# Altium footprint library CM5_Projeto_R6.PcbLib: 38 footprints (part 1 of 3)
Each footprint in its own frame and in the unit in brackets; x right, y up, seen from the top. Pads: shape width x height; smd on the part's side, far side on the other; paste and mask are expansions set on the pad; w line width, h text height; cw(c..) or ccw(c..) is an arc to the next point about the centre after c.
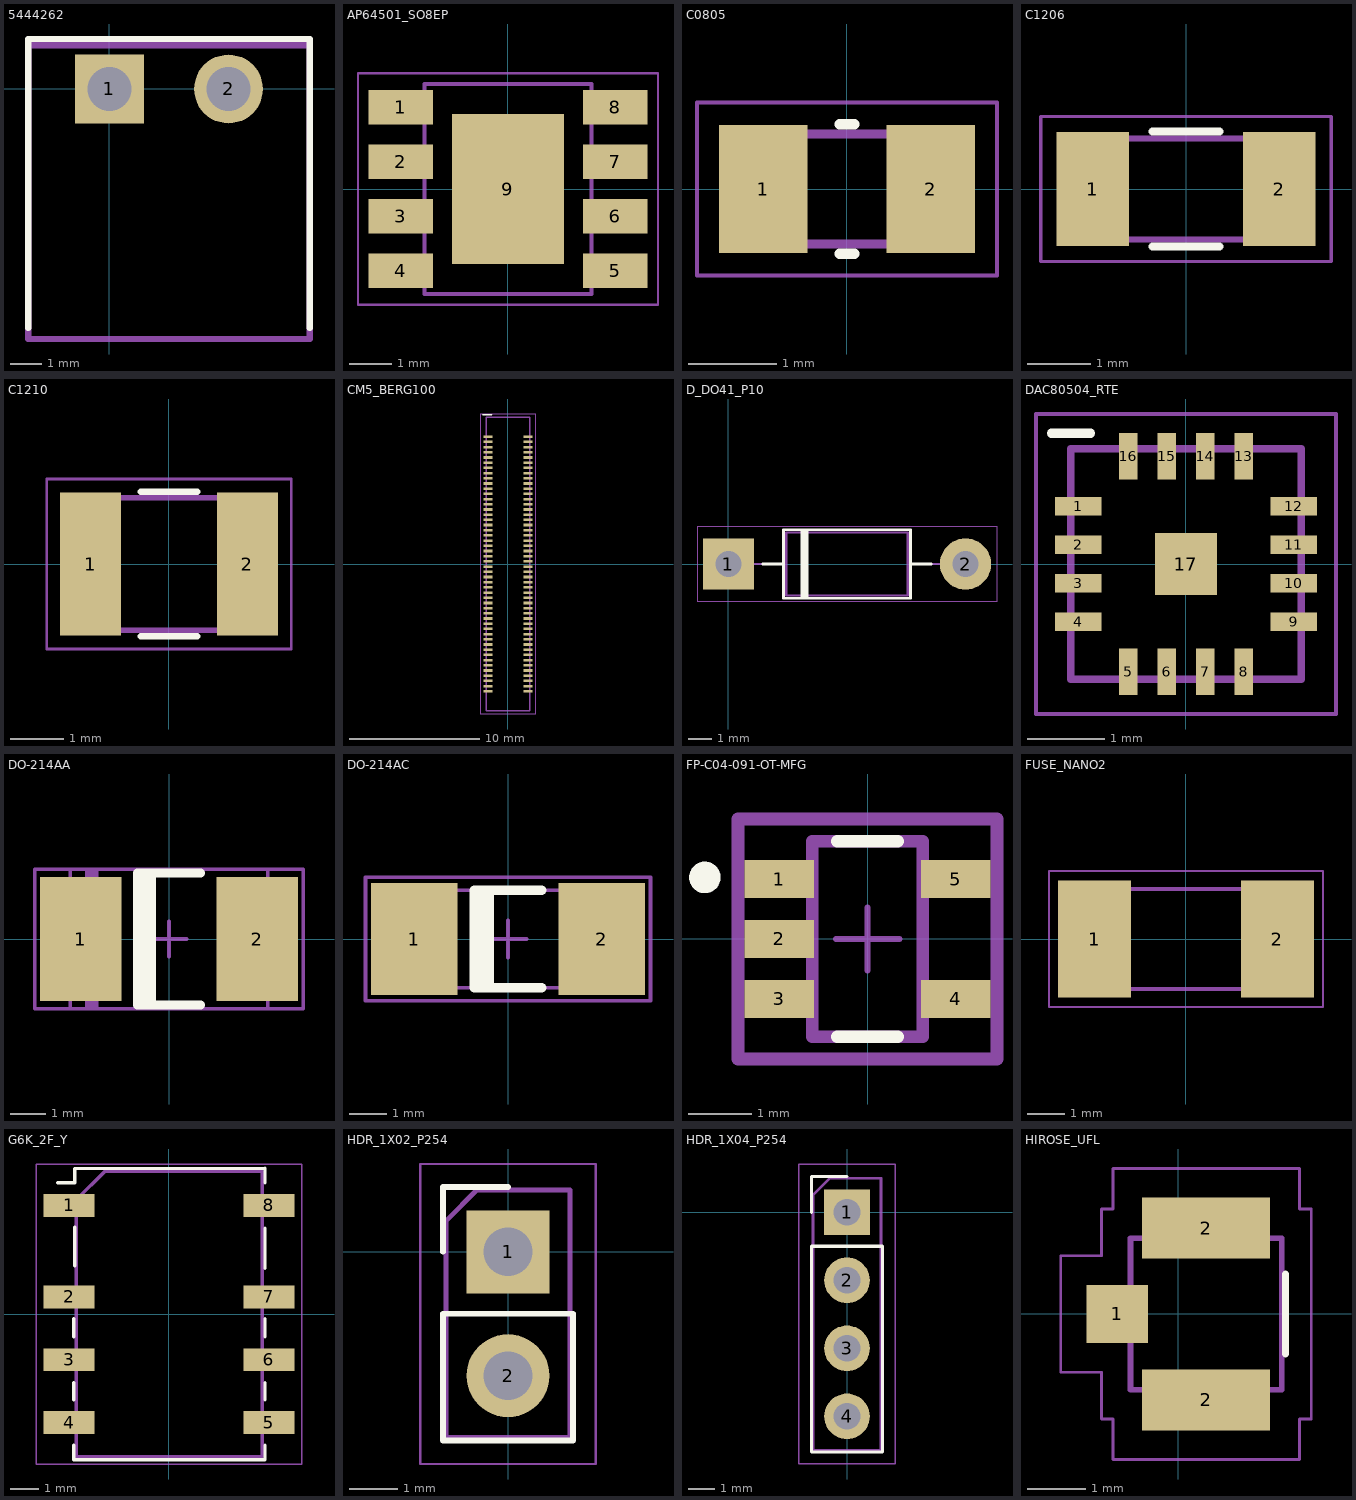
[diagram p0: the footprints below, top view; thin cyan lines are the x and y axes]

## 5444262 [mm] "Phoenix 5444262; 2 vias 3.81 mm. Modelo STEP extraido do PCB_Source_IoT; plug 5447861 incluido na montagem 3D."
height 11.2
pads (2):
  rect 2.2x2.2 hole 1.4 mask+0.1: 1(0,0)
  round 2.2 hole 1.4 mask+0.1: 2(3.81,0)
Top Overlay:
  lines w0.2: -2.6,-7.65 -2.6,1.6 6.41,1.6 6.41,-7.65
Bottom Assembly:
  lines w0.2: 6.4,-8 -2.6,-8 -2.6,1.4 6.41,1.4 6.41,-8
Bottom Component Center:
  lines w0.2: -2.6,-8 6.41,-8 6.41,1.4 -2.6,1.4 -2.6,-8
Top Component Center (Mech16):
  text "'.Designator'" at 1.789,-4.331 h1.5
3D body "pxc_1803277_05_MC-1-5-2-G-3-81_3D.stp": height 7.25, standoff -3.4, extent -2.6,-7.95 6.41,1.35
3D body "pxc_1803578_07_MC-1-5-2-ST-3-81_3D.stp": height 7.7, standoff -3.4, extent -2.3,-18.6 6.11,-2.5

## AP64501_SO8EP [mm] "CM5 R3; fonte: CM5_Photonic.PcbLib; serigrafia revisada a 10 mil"
pads (9):
  rect 1.505x0.802 smd paste+0 mask+0.05: 1(-2.497,1.905) 2(-2.497,0.635) 3(-2.497,-0.635) 4(-2.497,-1.905) 5(2.498,-1.905) 6(2.498,-0.635) 7(2.498,0.635) 8(2.498,1.905)
  rect 2.613x3.502 smd paste-3.502 mask+0.05: 9(0,0)
Top Paste:
  rectangle: -1.163,0.176 -0.143,1.575
  rectangle: -1.163,-1.575 -0.143,-0.175
  rectangle: 0.143,0.176 1.163,1.575
  rectangle: 0.143,-1.575 1.163,-0.175
Bottom Assembly:
  lines w0.1: -1.95,-2.45 -1.95,2.45 1.95,2.45 1.95,-2.45 -1.95,-2.45
Bottom Component Center:
  lines w0.05: -3.5,-2.7 -3.5,2.7 3.5,2.7 3.5,-2.7 -3.5,-2.7
3D body "AP64501_SO8EP.step": height 1.75, standoff 0, extent -3,-2.45 3,2.45

## C0805 [mm] "CM5 R3; fonte: CM5_Photonic.PcbLib; serigrafia revisada a 10 mil"
pads (2):
  rect 1x1.45 smd paste+0 mask+0.05: 1(-0.95,0) 2(0.95,0)
Top Overlay:
  lines w0.12: -0.08,-0.735 0.08,-0.735 ; -0.08,0.735 0.08,0.735
Bottom Assembly:
  lines w0.1: -1,-0.625 -1,0.625 1,0.625 1,-0.625 -1,-0.625
Bottom Component Center:
  lines w0.05: -1.7,-0.98 -1.7,0.98 1.7,0.98 1.7,-0.98 -1.7,-0.98
3D body "C0805.step": height 1.25, standoff 0, extent -1,-0.625 1,0.625

## C1206 [mm] "CM5 R3; fonte: CM5_Photonic.PcbLib; serigrafia revisada a 10 mil"
pads (2):
  rect 1.15x1.8 smd paste+0 mask+0.05: 1(-1.475,0) 2(1.475,0)
Top Overlay:
  lines w0.12: -0.53,-0.91 0.53,-0.91 ; -0.53,0.91 0.53,0.91
Bottom Assembly:
  lines w0.1: -1.6,-0.8 -1.6,0.8 1.6,0.8 1.6,-0.8 -1.6,-0.8
Bottom Component Center:
  lines w0.05: -2.3,-1.15 -2.3,1.15 2.3,1.15 2.3,-1.15 -2.3,-1.15
3D body "C1206.step": height 1.6, standoff 0, extent -1.6,-0.8 1.6,0.8

## C1210 [mm] "CM5 R3; fonte: CM5_Photonic.PcbLib; serigrafia revisada a 10 mil"
pads (2):
  rect 1.15x2.7 smd paste+0 mask+0.05: 1(-1.475,0) 2(1.475,0)
Top Overlay:
  lines w0.12: -0.53,-1.36 0.53,-1.36 ; -0.53,1.36 0.53,1.36
Bottom Assembly:
  lines w0.1: -1.6,-1.25 -1.6,1.25 1.6,1.25 1.6,-1.25 -1.6,-1.25
Bottom Component Center:
  lines w0.05: -2.3,-1.6 -2.3,1.6 2.3,1.6 2.3,-1.6 -2.3,-1.6
3D body "C1210.step": height 2.5, standoff 0, extent -1.6,-1.25 1.6,1.25

## CM5_BERG100 [mm] "CM5 R3; fonte: CM5_Photonic.PcbLib; serigrafia revisada a 10 mil"
pads (100):
  rect 0.7x0.2 smd paste+0 mask+0.03: 1(-1.54,9.8) 2(1.54,9.8) 3(-1.54,9.4) 4(1.54,9.4) 5(-1.54,9) 6(1.54,9) 7(-1.54,8.6) 8(1.54,8.6) 9(-1.54,8.2) 10(1.54,8.2) 11(-1.54,7.8) 12(1.54,7.8) 13(-1.54,7.4) 14(1.54,7.4) 15(-1.54,7) 16(1.54,7) 17(-1.54,6.6) 18(1.54,6.6) 19(-1.54,6.2) 20(1.54,6.2) 21(-1.54,5.8) 22(1.54,5.8) 23(-1.54,5.4) 24(1.54,5.4) 25(-1.54,5) 26(1.54,5) 27(-1.54,4.6) 28(1.54,4.6) 29(-1.54,4.2) 30(1.54,4.2) 31(-1.54,3.8) 32(1.54,3.8) 33(-1.54,3.4) 34(1.54,3.4) 35(-1.54,3) 36(1.54,3) 37(-1.54,2.6) 38(1.54,2.6) 39(-1.54,2.2) 40(1.54,2.2) 41(-1.54,1.8) 42(1.54,1.8) 43(-1.54,1.4) 44(1.54,1.4) 45(-1.54,1) 46(1.54,1) 47(-1.54,0.6) 48(1.54,0.6) 49(-1.54,0.2) 50(1.54,0.2) 51(-1.54,-0.2) 52(1.54,-0.2) 53(-1.54,-0.6) 54(1.54,-0.6) 55(-1.54,-1) 56(1.54,-1) 57(-1.54,-1.4) 58(1.54,-1.4) 59(-1.54,-1.8) 60(1.54,-1.8) 61(-1.54,-2.2) 62(1.54,-2.2) 63(-1.54,-2.6) 64(1.54,-2.6) 65(-1.54,-3) 66(1.54,-3) 67(-1.54,-3.4) 68(1.54,-3.4) 69(-1.54,-3.8) 70(1.54,-3.8) 71(-1.54,-4.2) 72(1.54,-4.2) 73(-1.54,-4.6) 74(1.54,-4.6) 75(-1.54,-5) 76(1.54,-5) 77(-1.54,-5.4) 78(1.54,-5.4) 79(-1.54,-5.8) 80(1.54,-5.8) 81(-1.54,-6.2) 82(1.54,-6.2) 83(-1.54,-6.6) 84(1.54,-6.6) 85(-1.54,-7) 86(1.54,-7) 87(-1.54,-7.4) 88(1.54,-7.4) 89(-1.54,-7.8) 90(1.54,-7.8) 91(-1.54,-8.2) 92(1.54,-8.2) 93(-1.54,-8.6) 94(1.54,-8.6) 95(-1.54,-9) 96(1.54,-9) 97(-1.54,-9.4) 98(1.54,-9.4) 99(-1.54,-9.8) 100(1.54,-9.8)
Top Overlay:
  lines w0.12: -1.94,11.5 -1.24,11.5
Bottom Assembly:
  lines w0.1: -1.69,-11.3 -1.69,11.3 1.69,11.3 1.69,-11.3 -1.69,-11.3
Bottom Component Center:
  lines w0.05: -2.14,-11.55 -2.14,11.55 2.14,11.55 2.14,-11.55 -2.14,-11.55
3D body "CM5_BERG100.step": height 3.14, standoff 0, extent -1.655,-11.3 1.655,11.3

## D_DO41_P10 [mm] "CM5 R3; fonte: CM5_Photonic.PcbLib; serigrafia revisada a 10 mil"
pads (2):
  rect 2.2x2.2 hole 1.1 paste-2.2 mask+0.05: 1(0,0)
  round 2.2 hole 1.1 paste-2.2 mask+0.05: 2(10.16,0)
Top Overlay:
  lines w0.12: 1.47,0 2.36,0 ; 3.14,-1.47 3.14,1.47 ; 3.26,-1.47 3.26,1.47 ; 3.38,-1.47 3.38,1.47 ; 7.8,0 8.69,0 ; 2.36,-1.47 2.36,1.47 7.8,1.47 7.8,-1.47 2.36,-1.47
Bottom Assembly:
  lines w0.1: 0,0 2.48,0 ; 3.16,-1.35 3.16,1.35 ; 3.26,-1.35 3.26,1.35 ; 3.36,-1.35 3.36,1.35 ; 7.68,0 10.16,0 ; 2.48,-1.35 2.48,1.35 7.68,1.35 7.68,-1.35 2.48,-1.35
Bottom Component Center:
  lines w0.05: -1.35,-1.6 -1.35,1.6 11.51,1.6 11.51,-1.6 -1.35,-1.6
3D body "D_DO41_P10.step": height 3.21, standoff 0, extent -0.4,-1.36 10.56,1.36

## DAC80504_RTE [mm] "CM5 R3; fonte: CM5_Photonic.PcbLib; serigrafia revisada a 10 mil"
pads (17):
  rect 0.6x0.24 smd paste+0 mask+0.05: 1(-1.4,0.75) 2(-1.4,0.25) 3(-1.4,-0.25) 4(-1.4,-0.75) 9(1.4,-0.75) 10(1.4,-0.25) 11(1.4,0.25) 12(1.4,0.75)
  rect 0.24x0.6 smd paste+0 mask+0.05: 5(-0.75,-1.4) 6(-0.25,-1.4) 7(0.25,-1.4) 8(0.75,-1.4) 13(0.75,1.4) 14(0.25,1.4) 15(-0.25,1.4) 16(-0.75,1.4)
  rect 0.8x0.8 smd paste-0.8 mask+0.05: 17(0,0)
Top Overlay:
  lines w0.12: -1.75,1.7 -1.24,1.7
Top Paste:
  rectangle: -0.38,-0.38 0.38,0.38
Bottom Assembly:
  lines w0.1: -1.5,-1.5 -1.5,1.5 1.5,1.5 1.5,-1.5 -1.5,-1.5
Bottom Component Center:
  lines w0.05: -1.95,-1.95 -1.95,1.95 1.95,1.95 1.95,-1.95 -1.95,-1.95
3D body "DAC80504_RTE0016D.step": height 0.75, standoff 0, extent -1.55,-1.55 1.55,1.55

## DO-214AA [mm] "CM5 R3; fonte: PcbLib_Source_IoT.PcbLib; serigrafia revisada a 10 mil"
pads (2):
  rect 2.3x3.5 smd paste+0 mask+0.05: 1(-2.5,0) 2(2.5,0)
Top Overlay:
  rectangle: -0.9,-2 -0.5,2
  lines w0.254: -0.5,-1.875 -0.5,1.875 ; 0.9,-1.875 -0.9,-1.875 -0.9,1.875 0.9,1.875
Bottom Assembly:
  lines w0.1: -0.5,0 0.5,0 ; 0,-0.5 0,0.5 ; -3.8,-1.975 3.8,-1.975 3.8,1.975 -3.8,1.975 -3.8,-1.975
Bottom Component Center:
  rectangle: -2.375,-1.975 -2,1.975
  lines w0.1: -2.8,-1.975 -2.8,1.975 2.8,1.975 2.8,-1.975 -2.8,-1.975
3D body "User Library-DO-214AA(SMB).step": height 2.65, standoff 0, extent -2.794,-1.975 2.794,1.975

## DO-214AC [mm] "CM5 R3; fonte: PcbLib_Source_IoT.PcbLib; serigrafia revisada a 10 mil"
pads (2):
  rect 2.3x3 smd paste+0 mask+0.05: 1(-2.5,0) 2(2.5,0)
Top Overlay:
  rectangle: -0.9,-1.3 -0.5,1.3
  lines w0.254: -0.5,-1.3 -0.5,1.3 ; 0.9,-1.3 -0.9,-1.3 -0.9,1.3 0.9,1.3
Bottom Assembly:
  lines w0.1: -0.5,0 0.5,0 ; 0,-0.5 0,0.5 ; -3.8,-1.65 3.8,-1.65 3.8,1.65 -3.8,1.65 -3.8,-1.65
Bottom Component Center:
  rectangle: -1.975,-1.3 -1.6,1.3
  lines w0.1: -2.6,-1.3 -2.6,1.3 2.6,1.3 2.6,-1.3 -2.6,-1.3
3D body "User Library-DO-214AC SMA.step": height 2.4, standoff 0, extent -2.6,-1.3 2.6,1.3

## FP-C04-091-OT-MFG [mm] "CM5 R3; fonte: PCB-PCEIOT.PcbLib; serigrafia revisada a 10 mil"
pads (5):
  rect 1.1x0.6 smd paste+0 mask+0.04: 1(-1.4,0.95) 2(-1.4,0) 3(-1.4,-0.95) 4(1.4,-0.95) 5(1.4,0.95)
Top Overlay:
  circle w0.25: c-2.575,0.975 r0.125
  lines w0.2: -0.475,-1.55 0.475,-1.55 ; -0.475,1.55 0.475,1.55
Bottom Assembly:
  lines w0.2: -2.05,-1.9 -2.05,1.9 2.05,1.9 2.05,-1.9 -2.05,-1.9 ; -0.875,-1.55 -0.875,1.55 0.875,1.55 0.875,-1.55 -0.875,-1.55
Bottom Component Center:
  lines w0.1: -0.5,0 0.5,0 ; 0,-0.5 0,0.5
  lines w0.2: -2.05,-1.9 -2.05,1.9 2.05,1.9 2.05,-1.9 -2.05,-1.9
3D body "SOT-23-5_MC_MCH.step": height 1.45, standoff 0, extent -1.6,-1.549 1.6,1.549

## FUSE_NANO2 [mm] "CM5 R3; fonte: CM5_Photonic.PcbLib; serigrafia revisada a 10 mil"
pads (2):
  rect 1.96x3.15 smd paste+0 mask+0.05: 1(-2.455,0) 2(2.455,0)
Bottom Assembly:
  lines w0.1: -3.05,-1.345 -3.05,1.345 3.05,1.345 3.05,-1.345 -3.05,-1.345
Bottom Component Center:
  lines w0.05: -3.685,-1.825 -3.685,1.825 3.685,1.825 3.685,-1.825 -3.685,-1.825
3D body "FUSE_NANO2.step": height 2.78, standoff 0, extent -3.05,-1.375 3.05,1.375

## G6K_2F_Y [mm] "CM5 R3; fonte: CM5_Photonic.PcbLib; serigrafia revisada a 10 mil"
pads (8):
  rect 1.8x0.8 smd paste+0 mask+0.05: 1(-3.5,3.8) 2(-3.5,0.6) 3(-3.5,-1.6) 4(-3.5,-3.8) 5(3.5,-3.8) 6(3.5,-1.6) 7(3.5,0.6) 8(3.5,3.8)
Top Overlay:
  lines w0.12: -3.9,4.59 -3.3,4.59 -3.3,5.09 3.36,5.1 3.36,4.6 ; -3.34,-4.6 -3.34,-5.1 3.36,-5.1 3.36,-4.6 ; -3.34,-3 -3.34,-2.4 ; -3.34,-0.8 -3.34,-0.17 ; -3.3,1.69 -3.3,3.03 ; 3.36,-3 3.36,-2.4 ; 3.36,-0.8 3.36,-0.17 ; 3.36,1.6 3.36,3
Bottom Assembly:
  lines w0.12: -3.24,-5 -3.24,4 -2.24,5 3.26,5 3.26,-5 -3.24,-5
Bottom Component Center:
  lines w0.05: -4.65,-5.25 -4.65,5.25 4.65,5.25 4.65,-5.25 -4.65,-5.25
3D body "G6K_2F_Y.step": height 5.58, standoff 0, extent -3.9,-5 3.9,5

## HDR_1X02_P254 [mm] "CM5 R3; fonte: CM5_Photonic.PcbLib; serigrafia revisada a 10 mil"
pads (2):
  rect 1.7x1.7 hole 1 paste-1.7 mask+0.05: 1(0,0)
  round 1.7 hole 1 paste-1.7 mask+0.05: 2(0,-2.54)
Top Overlay:
  lines w0.12: -1.33,0 -1.33,1.33 0,1.33 ; -1.33,-3.87 -1.33,-1.27 1.33,-1.27 1.33,-3.87 -1.33,-3.87
Bottom Assembly:
  lines w0.1: -1.27,-3.81 -1.27,0.635 -0.635,1.27 1.27,1.27 1.27,-3.81 -1.27,-3.81
Bottom Component Center:
  lines w0.05: -1.8,-4.35 -1.8,1.8 1.8,1.8 1.8,-4.35 -1.8,-4.35
3D body "HDR_1X02_P254.step": height 8.54, standoff 0, extent -1.27,-3.81 1.27,1.27

## HDR_1X04_P254 [mm] "CM5 R3; fonte: CM5_Photonic.PcbLib; serigrafia revisada a 10 mil"
pads (4):
  rect 1.7x1.7 hole 1 paste-1.7 mask+0.05: 1(0,0)
  round 1.7 hole 1 paste-1.7 mask+0.05: 2(0,-2.54) 3(0,-5.08) 4(0,-7.62)
Top Overlay:
  lines w0.12: -1.33,0 -1.33,1.33 0,1.33 ; -1.33,-8.95 -1.33,-1.27 1.33,-1.27 1.33,-8.95 -1.33,-8.95
Bottom Assembly:
  lines w0.1: -1.27,-8.89 -1.27,0.635 -0.635,1.27 1.27,1.27 1.27,-8.89 -1.27,-8.89
Bottom Component Center:
  lines w0.05: -1.8,-9.4 -1.8,1.8 1.8,1.8 1.8,-9.4 -1.8,-9.4
3D body "HDR_1X04_P254.step": height 8.54, standoff 0, extent -1.27,-8.89 1.27,1.27

## HIROSE_UFL [mm] "CM5 R3; fonte: CM5_Photonic.PcbLib; serigrafia revisada a 10 mil"
pads (3):
  rect 1.05x1 smd paste+0 mask+0.05: 1(-1.05,0)
  rect 2.2x1.05 smd paste+0 mask+0.05: 2(0.475,-1.475) 2(0.475,1.475)
Top Overlay:
  lines w0.12: 1.835,-0.687 1.835,0.687
Bottom Assembly:
  lines w0.1: -1.075,-0.3 -1.075,0.15 -0.925,0.3 -0.825,0.3 -0.825,1.3 -0.425,1.3 -0.425,1.5 1.375,1.5 1.375,1.3 1.775,1.3 1.775,-1.3 1.375,-1.3 1.375,-1.5 -0.425,-1.5 -0.425,-1.3 -0.825,-1.3 -0.825,-0.3 -1.075,-0.3
Bottom Component Center:
  lines w0.05: -2.02,-1 -2.02,1 -1.32,1 -1.32,1.8 -1.12,1.8 -1.12,2.5 2.08,2.5 2.08,1.8 2.28,1.8 2.28,-1.8 2.08,-1.8 2.08,-2.5 -1.12,-2.5 -1.12,-1.8 -1.32,-1.8 -1.32,-1 -2.02,-1
3D body "HIROSE_UFL.step": height 1.25, standoff 0, extent -1.55,-1.5 1.55,1.5